# Altium footprint library WCAP-FTXX.PcbLib: 46 footprints (part 3 of 3)
Each footprint in its own frame and in the unit in brackets; x right, y up, seen from the top. Pads: shape width x height; smd on the part's side, far side on the other; paste and mask are expansions set on the pad; w line width, h text height; cw(c..) or ccw(c..) is an arc to the next point about the centre after c.
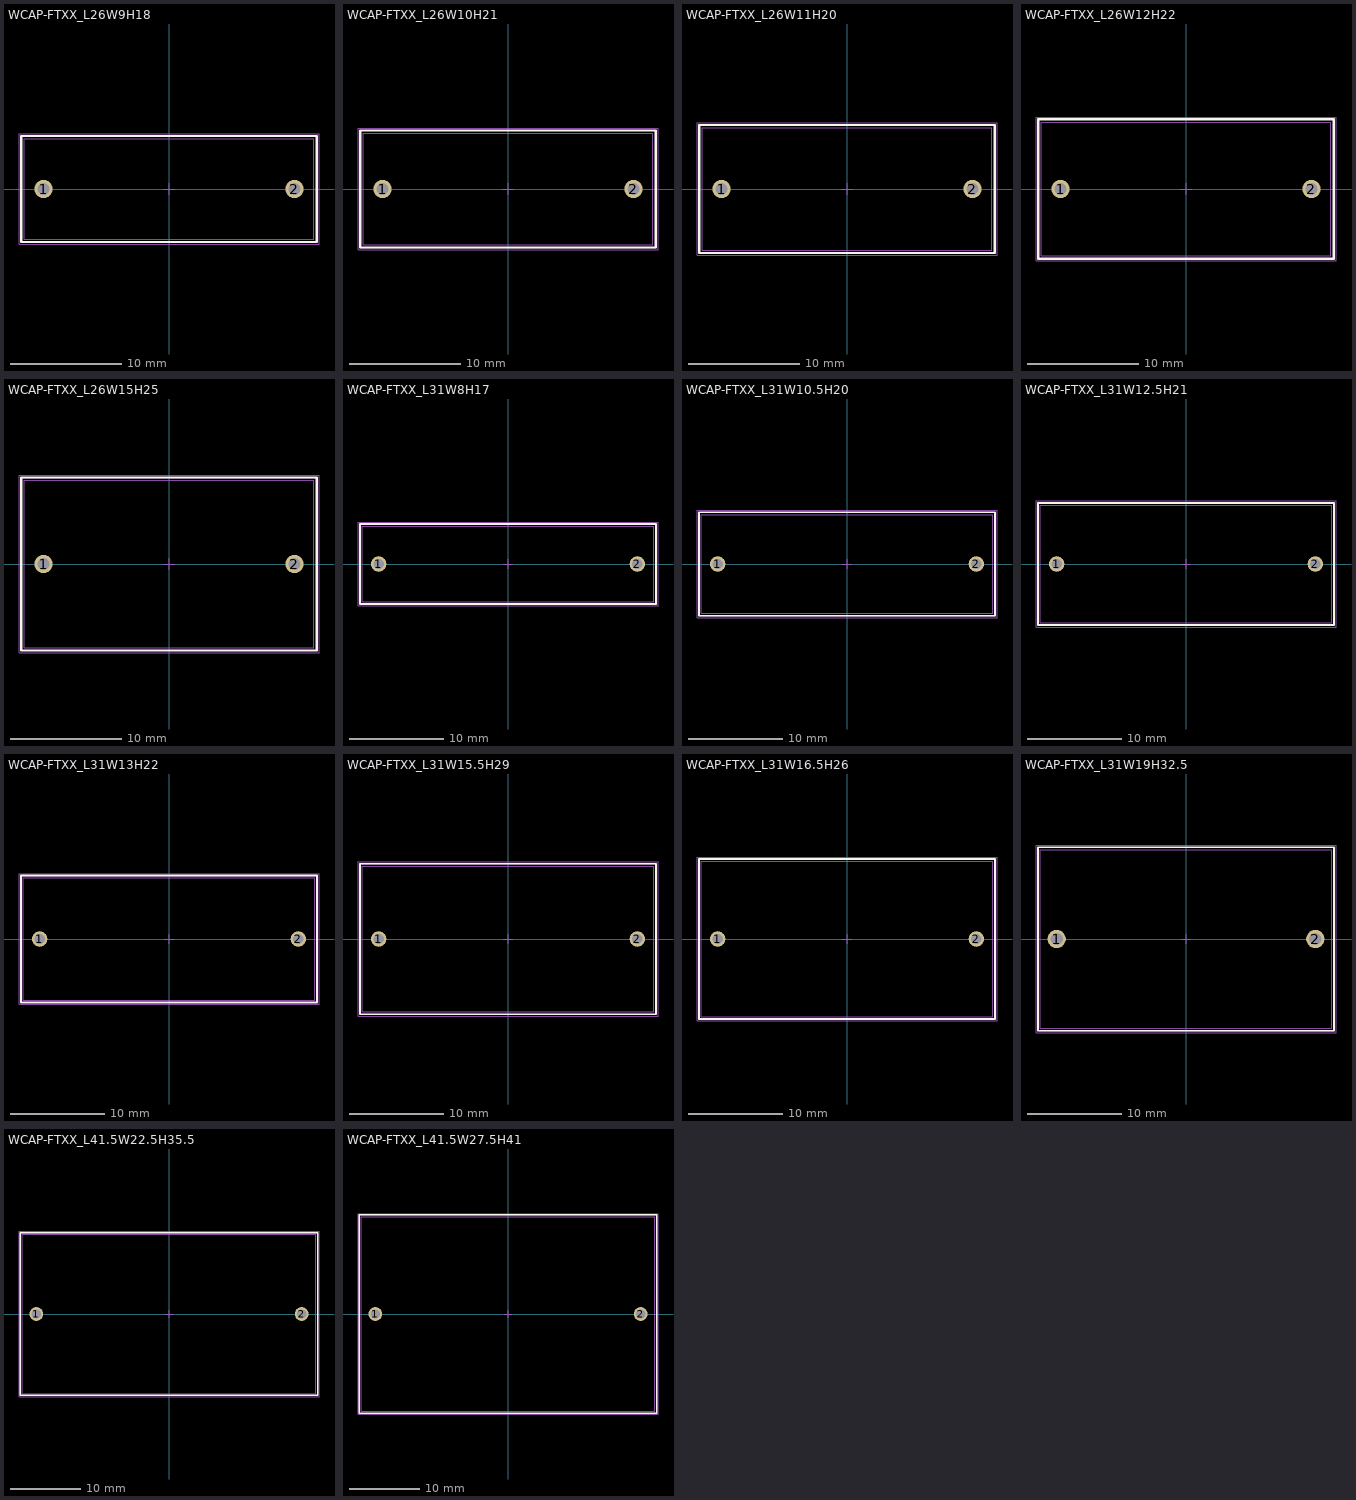
[diagram p2: the footprints below, top view; thin cyan lines are the x and y axes]

## WCAP-FTXX_L26W9H18 [mm] "Film Capacitors, 26x9x18mm"
height 18
pads (2):
  round 1.65 hole 1.1: 1(-11.25,0) 2(11.25,0)
Top Overlay:
  lines w0.2: -13.25,-4.75 13.25,-4.75 13.25,4.75 -13.25,4.75 -13.25,-4.75
Top Assembly:
  lines w0.1: -13.25,-4.75 13.25,-4.75 13.25,4.75 -13.25,4.75 -13.25,-4.75
Top Designator:
  text ".Designator" at -3.647,-0.357 h1
Top 3D Body:
  lines w0.1: -13,-4.5 -13,4.5 13,4.5 13,-4.5 -13,-4.5
Top Courtyard:
  lines w0.05: -13.45,-4.95 13.45,-4.95 13.45,4.95 -13.45,4.95 -13.45,-4.95
Top Component Center:
  lines w0.1: -0.5,0 0.5,0 ; 0,-0.5 0,0.5
3D body "22,5x26x18x9_CS.stp": height 18.05, standoff -3.95, extent -13,-4.5 13,4.5

## WCAP-FTXX_L26W10H21 [mm] "Film Capacitors, 26x10x21mm"
height 21
pads (2):
  round 1.65 hole 1.1: 1(-11.25,0) 2(11.25,0)
Top Overlay:
  lines w0.2: -13.25,-5.25 -13.25,5.25 13.25,5.25 13.25,-5.25 -13.25,-5.25
Top Assembly:
  lines w0.1: -13.25,-5.25 -13.25,5.25 13.25,5.25 13.25,-5.25 -13.25,-5.25
Top Designator:
  text ".Designator" at -3.647,-0.357 h1
Top 3D Body:
  lines w0.1: -13,-5 13,-5 13,5 -13,5 -13,-5
Top Courtyard:
  lines w0.05: -13.45,-5.45 -13.45,5.45 13.45,5.45 13.45,-5.45 -13.45,-5.45
Top Component Center:
  lines w0.1: -0.5,0 0.5,0 ; 0,-0.5 0,0.5
3D body "22,5x26x21x10_CS.stp": height 21.05, standoff -3.95, extent -13,-5 13,5

## WCAP-FTXX_L26W11H20 [mm] "Film Capacitors, 26x11x20mm"
height 20
pads (2):
  round 1.65 hole 1.1: 1(-11.25,0) 2(11.25,0)
Top Overlay:
  lines w0.2: -13.25,-5.75 13.25,-5.75 13.25,5.75 -13.25,5.75 -13.25,-5.75
Top Assembly:
  lines w0.1: -13.25,-5.75 13.25,-5.75 13.25,5.75 -13.25,5.75 -13.25,-5.75
Top Designator:
  text ".Designator" at -3.647,-0.357 h1
Top 3D Body:
  lines w0.1: -13,-5.5 -13,5.5 13,5.5 13,-5.5 -13,-5.5
Top Courtyard:
  lines w0.05: -13.45,-5.95 13.45,-5.95 13.45,5.95 -13.45,5.95 -13.45,-5.95
Top Component Center:
  lines w0.1: -0.5,0 0.5,0 ; 0,-0.5 0,0.5
3D body "22,5x26x20x11_CS.stp": height 20.05, standoff -3.95, extent -13,-5.5 13,5.5

## WCAP-FTXX_L26W12H22 [mm] "Film Capacitors, 26x12x22mm"
height 22
pads (2):
  round 1.65 hole 1.1: 1(-11.25,0) 2(11.25,0)
Top Overlay:
  lines w0.2: -13.25,-6.25 -13.25,6.25 13.25,6.25 13.25,-6.25 -13.25,-6.25
Top Assembly:
  lines w0.1: -13.25,-6.25 -13.25,6.25 13.25,6.25 13.25,-6.25 -13.25,-6.25
Top Designator:
  text ".Designator" at -3.647,-0.357 h1
Top 3D Body:
  lines w0.1: -13,-6 13,-6 13,6 -13,6 -13,-6
Top Courtyard:
  lines w0.05: -13.45,-6.45 -13.45,6.45 13.45,6.45 13.45,-6.45 -13.45,-6.45
Top Component Center:
  lines w0.1: -0.5,0 0.5,0 ; 0,-0.5 0,0.5
3D body "22,5x26x12x22.stp": height 22.2, standoff -3.8, extent -13,-6 13,6

## WCAP-FTXX_L26W15H25 [mm] "Film Capacitors, 26x15x25mm"
height 25
pads (2):
  round 1.65 hole 1.1: 1(-11.25,0) 2(11.25,0)
Top Overlay:
  lines w0.2: -13.25,-7.75 -13.25,7.75 13.25,7.75 13.25,-7.75 -13.25,-7.75
Top Assembly:
  lines w0.1: -13.25,-7.75 -13.25,7.75 13.25,7.75 13.25,-7.75 -13.25,-7.75
Top Designator:
  text ".Designator" at -3.647,-0.357 h1
Top 3D Body:
  lines w0.1: -13,-7.5 13,-7.5 13,7.5 -13,7.5 -13,-7.5
Top Courtyard:
  lines w0.05: -13.45,-7.95 -13.45,7.95 13.45,7.95 13.45,-7.95 -13.45,-7.95
Top Component Center:
  lines w0.1: -0.5,0 0.5,0 ; 0,-0.5 0,0.5
3D body "22,5x26x25x15_CS.stp": height 25.05, standoff -3.95, extent -13,-7.5 13,7.5

## WCAP-FTXX_L31W8H17 [mm] "Film Capacitors, 31x8x17mm"
height 17
pads (2):
  round 1.65 hole 1.1: 1(-13.75,0) 2(13.75,0)
Top Overlay:
  lines w0.2: -15.75,-4.25 -15.75,4.25 15.75,4.25 15.75,-4.25 -15.75,-4.25
Top Assembly:
  lines w0.1: -15.75,-4.25 -15.75,4.25 15.75,4.25 15.75,-4.25 -15.75,-4.25
Top Designator:
  text ".Designator" at -3.647,-0.357 h1
Top 3D Body:
  lines w0.1: -15.5,-4 15.5,-4 15.5,4 -15.5,4 -15.5,-4
Top Courtyard:
  lines w0.05: -15.95,-4.45 -15.95,4.45 15.95,4.45 15.95,-4.45 -15.95,-4.45
Top Component Center:
  lines w0.1: -0.5,0 0.5,0 ; 0,-0.5 0,0.5
3D body "STP_download_WE-FTXX_890334027009CS (rev1).stp": height 17.05, standoff -3.95, extent -15.5,-4 15.5,4

## WCAP-FTXX_L31W10.5H20 [mm] "Film Capacitors, 31x10.5x20mm"
height 20
pads (2):
  round 1.65 hole 1.1: 1(-13.75,0) 2(13.75,0)
Top Overlay:
  lines w0.2: -15.75,-5.5 -15.75,5.5 15.75,5.5 15.75,-5.5 -15.75,-5.5
Top Assembly:
  lines w0.1: -15.75,-5.5 -15.75,5.5 15.75,5.5 15.75,-5.5 -15.75,-5.5
Top Designator:
  text ".Designator" at -3.647,-0.357 h1
Top 3D Body:
  lines w0.1: -15.5,-5.25 15.5,-5.25 15.5,5.25 -15.5,5.25 -15.5,-5.25
Top Courtyard:
  lines w0.05: -15.95,-5.7 -15.95,5.7 15.95,5.7 15.95,-5.7 -15.95,-5.7
Top Component Center:
  lines w0.1: -0.5,0 0.5,0 ; 0,-0.5 0,0.5
3D body "27,5x31x20x10,5_CS.stp": height 20.05, standoff -3.95, extent -15.5,-5.25 15.5,5.25

## WCAP-FTXX_L31W12.5H21 [mm] "Film Capacitors, 31x12.5x21mm"
height 21
pads (2):
  round 1.65 hole 1.1: 1(-13.75,0) 2(13.75,0)
Top Overlay:
  lines w0.2: -15.75,-6.5 -15.75,6.5 15.75,6.5 15.75,-6.5 -15.75,-6.5
Top Assembly:
  lines w0.1: -15.75,-6.5 -15.75,6.5 15.75,6.5 15.75,-6.5 -15.75,-6.5
Top Designator:
  text ".Designator" at -3.647,-0.357 h1
Top 3D Body:
  lines w0.1: -15.5,-6.25 15.5,-6.25 15.5,6.25 -15.5,6.25 -15.5,-6.25
Top Courtyard:
  lines w0.05: -15.95,-6.7 -15.95,6.7 15.95,6.7 15.95,-6.7 -15.95,-6.7
Top Component Center:
  lines w0.1: -0.5,0 0.5,0 ; 0,-0.5 0,0.5
3D body "27,5x31x21x12,5_CS.stp": height 21.05, standoff -3.95, extent -15.5,-6.25 15.5,6.25

## WCAP-FTXX_L31W13H22 [mm] "Film Capacitors, 31x13x22mm"
height 22
pads (2):
  round 1.65 hole 1.1: 1(-13.75,0) 2(13.75,0)
Top Overlay:
  lines w0.2: -15.75,-6.75 15.75,-6.75 15.75,6.75 -15.75,6.75 -15.75,-6.75
Top Assembly:
  lines w0.1: -15.75,-6.75 15.75,-6.75 15.75,6.75 -15.75,6.75 -15.75,-6.75
Top Designator:
  text ".Designator" at -3.647,-0.357 h1
Top 3D Body:
  lines w0.1: -15.5,-6.5 -15.5,6.5 15.5,6.5 15.5,-6.5 -15.5,-6.5
Top Courtyard:
  lines w0.05: -15.95,-6.95 15.95,-6.95 15.95,6.95 -15.95,6.95 -15.95,-6.95
Top Component Center:
  lines w0.1: -0.5,0 0.5,0 ; 0,-0.5 0,0.5
3D body "27,5x31x22x13_CS.stp": height 22.05, standoff -3.95, extent -15.5,-6.5 15.5,6.5

## WCAP-FTXX_L31W15.5H29 [mm] "Film Capacitors, 31x15.5x29mm"
height 29
pads (2):
  round 1.65 hole 1.1: 1(-13.75,0) 2(13.75,0)
Top Overlay:
  lines w0.2: -15.75,-8 -15.75,8 15.75,8 15.75,-8 -15.75,-8
Top Assembly:
  lines w0.1: -15.75,-8 -15.75,8 15.75,8 15.75,-8 -15.75,-8
Top Designator:
  text ".Designator" at -3.647,-0.357 h1
Top 3D Body:
  lines w0.1: -15.5,-7.75 15.5,-7.75 15.5,7.75 -15.5,7.75 -15.5,-7.75
Top Courtyard:
  lines w0.05: -15.95,-8.2 -15.95,8.2 15.95,8.2 15.95,-8.2 -15.95,-8.2
Top Component Center:
  lines w0.1: -0.5,0 0.5,0 ; 0,-0.5 0,0.5
3D body "27,5x31x29x15,5_CS.stp": height 29.05, standoff -3.95, extent -15.5,-7.75 15.5,7.75

## WCAP-FTXX_L31W16.5H26 [mm] "Film Capacitors, 31x16x26mm"
height 26
pads (2):
  round 1.65 hole 1.1: 1(-13.75,0) 2(13.75,0)
Top Overlay:
  lines w0.2: -15.75,-8.5 -15.75,8.5 15.75,8.5 15.75,-8.5 -15.75,-8.5
Top Assembly:
  lines w0.1: -15.75,-8.5 -15.75,8.5 15.75,8.5 15.75,-8.5 -15.75,-8.5
Top Designator:
  text ".Designator" at -3.647,-0.357 h1
Top 3D Body:
  lines w0.1: -15.5,-8.25 15.5,-8.25 15.5,8.25 -15.5,8.25 -15.5,-8.25
Top Courtyard:
  lines w0.05: -15.95,-8.7 -15.95,8.7 15.95,8.7 15.95,-8.7 -15.95,-8.7
Top Component Center:
  lines w0.1: -0.5,0 0.5,0 ; 0,-0.5 0,0.5
3D body "27,5x31x16,5x26.stp": height 26.2, standoff -3.8, extent -15.5,-8.25 15.5,8.25

## WCAP-FTXX_L31W19H32.5 [mm] "Film Capacitors, 31x19x32.5mm"
height 32.5
pads (2):
  round 1.95 hole 1.3: 1(-13.75,0) 2(13.75,0)
Top Overlay:
  lines w0.2: -15.75,-9.75 15.75,-9.75 15.75,9.75 -15.75,9.75 -15.75,-9.75
Top Assembly:
  lines w0.1: -15.75,-9.75 15.75,-9.75 15.75,9.75 -15.75,9.75 -15.75,-9.75
Top Designator:
  text ".Designator" at -3.647,-0.357 h1
Top 3D Body:
  lines w0.1: -15.5,-9.5 15.5,-9.5 15.5,9.5 -15.5,9.5 -15.5,-9.5
Top Courtyard:
  lines w0.05: -15.95,-9.95 15.95,-9.95 15.95,9.95 -15.95,9.95 -15.95,-9.95
Top Component Center:
  lines w0.1: -0.5,0 0.5,0 ; 0,-0.5 0,0.5
3D body "27,5x31x19x32,5.stp": height 32.55, standoff -3.95, extent -15.5,-9.5 15.5,9.5

## WCAP-FTXX_L41.5W22.5H35.5 [mm] "Film Capacitors, 41.5x22.5x35.5mm"
height 35.5
pads (2):
  round 1.95 hole 1.3: 1(-18.75,0) 2(18.75,0)
Top Overlay:
  lines w0.2: -21,-11.5 21,-11.5 21,11.5 -21,11.5 -21,-11.5
Top Assembly:
  lines w0.1: -21,-11.5 21,-11.5 21,11.5 -21,11.5 -21,-11.5
Top Designator:
  text ".Designator" at -3.647,-0.357 h1
Top 3D Body:
  lines w0.1: -20.75,-11.25 -20.75,11.25 20.75,11.25 20.75,-11.25 -20.75,-11.25
Top Courtyard:
  lines w0.05: -21.2,-11.7 21.2,-11.7 21.2,11.7 -21.2,11.7 -21.2,-11.7
Top Component Center:
  lines w0.1: -0.5,0 0.5,0 ; 0,-0.5 0,0.5
3D body "37,5x41,5x35,5x22,5_CS.stp": height 35.55, standoff -3.95, extent -20.75,-11.25 20.75,11.25

## WCAP-FTXX_L41.5W27.5H41 [mm] "Film Capacitors, 41.5x27.5x41mm"
height 41
pads (2):
  round 1.95 hole 1.3: 1(-18.75,0) 2(18.75,0)
Top Overlay:
  lines w0.2: -21,-14 -21,14 21,14 21,-14 -21,-14
Top Assembly:
  lines w0.1: -21,-14 -21,14 21,14 21,-14 -21,-14
Top Designator:
  text ".Designator" at -3.647,-0.357 h1
Top 3D Body:
  lines w0.1: -20.75,-13.75 20.75,-13.75 20.75,13.75 -20.75,13.75 -20.75,-13.75
Top Courtyard:
  lines w0.05: -21.2,-14.2 -21.2,14.2 21.2,14.2 21.2,-14.2 -21.2,-14.2
Top Component Center:
  lines w0.1: -0.5,0 0.5,0 ; 0,-0.5 0,0.5
3D body "37,5x41,5x27,5x41.stp": height 41.1, standoff -3.9, extent -20.75,-13.75 20.75,13.75